# Altium schematic symbol library AVR128DB28-I_SP.SchLib: 1 symbol
Pins are listed as number, name and electrical type; pins without a type are passive.

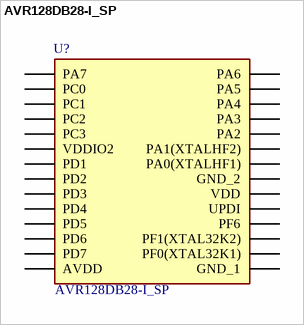
[diagram p0: symbol AVR128DB28-I_SP]

## AVR128DB28-I_SP
designator U?
8-bit Microcontrollers - MCU 128KB, SPDIP28, 85C, 24MHz, 12b ADC, Comp, Opamp, MVIO, ZCD, DAC, UART, SPI, TWI; Manufacturer_Name: Microchip; Manufacturer_Part_Number: AVR128DB28-I/SP; Geometry.Height: 5.08mm; Mouser Part Number: 579-AVR128DB28-I/SP; Mouser Price/Stock: https://www.mouser.co.uk/ProductDetail/Microchip-Technology/AVR128DB28-I-SP?qs=vmHwEFxEFR9SktvWL9jpqg%3D%3D; Datasheet Link: https://ww1.microchip.com/downloads/en/DeviceDoc/AVR128DB28-32-48-64-DataSheet-DS40002247A.pdf
footprint DIP794W56P254L3486H508Q28N
pins: 1 PA7, 2 PC0, 3 PC1, 4 PC2, 5 PC3, 6 VDDIO2, 7 PD1, 8 PD2, 9 PD3, 10 PD4, 11 PD5, 12 PD6, 13 PD7, 14 AVDD, 15 GND_1, 16 PF0(XTAL32K1), 17 PF1(XTAL32K2), 18 PF6, 19 UPDI, 20 VDD, 21 GND_2, 22 PA0(XTALHF1), 23 PA1(XTALHF2), 24 PA2, 25 PA3, 26 PA4, 27 PA5, 28 PA6